# Altium footprint library 00318201.PcbLib: 1 footprints
Each footprint in its own frame and in the unit in brackets; x right, y up, seen from the top. Pads: shape width x height; smd on the part's side, far side on the other; paste and mask are expansions set on the pad; w line width, h text height; cw(c..) or ccw(c..) is an arc to the next point about the centre after c.
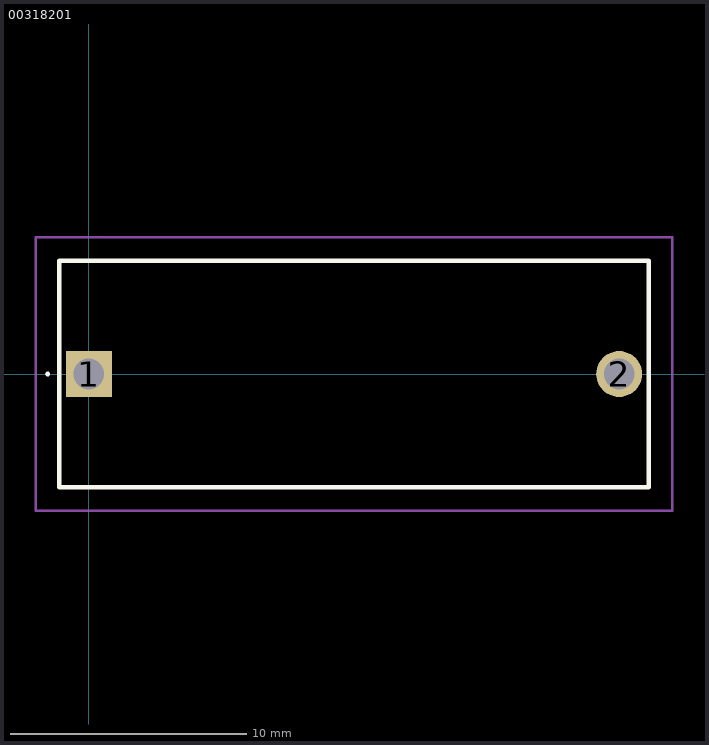
[diagram p0: the footprint, top view; thin cyan lines are the x and y axes]

## 00318201 [mm]
pads (2):
  rect 1.95x1.95 hole 1.3: 1(0,0)
  round 1.95 hole 1.3: 2(22.5,0)
Top Overlay:
  lines w0.1: -1.8,0 -1.8,0 ; -1.8,0 ccw(c-1.75,0) -1.7,0 ; -1.8,0 cw(c-1.75,0) -1.7,0 ; -1.7,0 -1.7,0
  lines w0.2: -1.25,-4.8 23.75,-4.8 23.75,4.8 -1.25,4.8 -1.25,-4.8
Mechanical 15:
  lines w0.1: -1.25,-4.8 23.75,-4.8 23.75,4.8 -1.25,4.8 -1.25,-4.8
Mechanical 20:
  lines w0.1: -2.25,-5.8 24.75,-5.8 24.75,5.8 -2.25,5.8 -2.25,-5.8